# Altium schematic symbol library MPM3620AGQV-Z.SchLib: 1 symbol
Pins are listed as number, name and electrical type; pins without a type are passive.

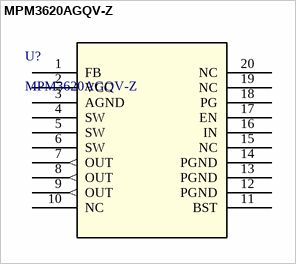
[diagram p0: symbol MPM3620AGQV-Z]

## MPM3620AGQV-Z
designator U?
24V Input 2A Module Synchronous Step-down Converter with Integrated Inductor and PG pin; Manufacturer_Name: Monolithic Power Systems; Copyright: Copyright (C) 2025 Ultra Librarian. All rights reserved.; Manufacturer_Part_Number: MPM3620AGQV-Z; RefDes: RefDes; Type: Type
footprint IC18_MPM3620AGQV-Z_MNP
pins: 1 FB, 2 VCC (power), 3 AGND (power), 4 SW, 5 SW, 6 SW, 7 OUT (out), 8 OUT (out), 9 OUT (out), 10 NC, 11 BST, 12 PGND (power), 13 PGND (power), 14 PGND (power), 15 NC, 16 IN, 17 EN, 18 PG, 19 NC, 20 NC